# Altium schematic symbol library Capacitor.SchLib: 735 symbols (part 14 of 20)
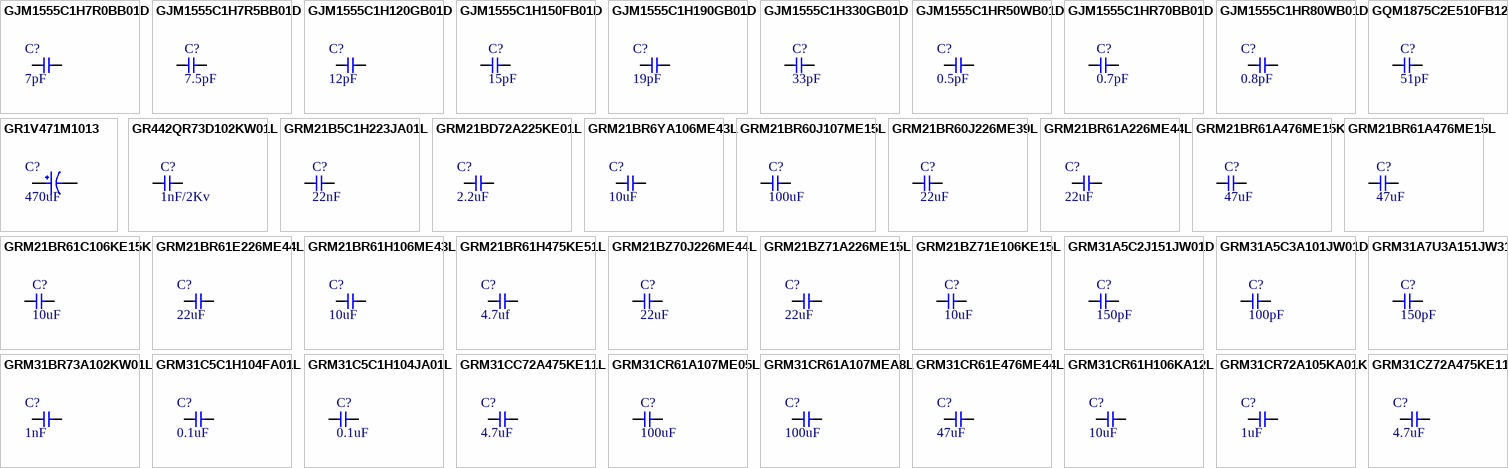
[diagram p31: symbols GJM1555C1H7R0BB01D to GRM31CZ72A475KE11L]

## GRM21BR6YA106ME43L
designator C?, comment 10uF
CAP CER 10UF 35V X5R 0805; Manufacturer: Murata; Manufacturer Part Number: GRM21BR6YA106ME43L; Tolerance: 20%; Supplier 1: Digi-Key; Stock 1: 153536; Pricing 1: 1=0.43, 10=0.302, 50=0.2114, 100=0.1811, 500=0.13584, 1000=0.11471 (USD); Mount: Surface Mount; Case/Package: 0805; Case Code (Metric): 2012; Case Code (Imperial): 0805; Weight: 0.000335oz; Min Operating Temperature: -55°C; Max Operating Temperature: 85°C; Capacitance: 10uF; Packaging: Tape and Reel; Voltage Rating: 35V; Dielectric: X5R; Termination: SMD/SMT; Voltage Rating (DC): 35V; Package Quantity: 3000; Length: 0.079inch; Width: 0.049inch; Height: 1.25mm; Thickness: 0.057inch; RoHS Compliant: Yes; ComponentLink1URL: http://www.mouser.com/ds/2/281/c02e-2905.pdf?src-supplier=Mouser; ComponentLink1Description: http://www.mouser.com/ds/2/281/c02e-2905.pdf?src-supplier=Mouser; ComponentLink2URL: http://search.murata.co.jp/Ceramy/image/img/A01X/G101/ENG/GRM21BR6YA106ME43-01.pdf?src-supplier=Digi-Key; ComponentLink2Description: http://search.murata.co.jp/Ceramy/image/img/A01X/G101/ENG/GRM21BR6YA106ME43-01.pdf?src-supplier=Digi-Key; Supplier Part Number 1: 490-10515-1-ND; LCSC Part Number: C361063
footprint Cap-0805 (SMD 0805)
pins: 1, 2

## GRM21BR60J107ME15L
designator C?, comment 100uF
CAP CER 100UF 6.3V X5R 0805; Manufacturer: Murata; Manufacturer Part Number: GRM21BR60J107ME15L; Item Type: Capacitors; Material: 4241ConductorMaterial; Tolerance: 20%; Supplier: Mouser; LCSC Part Number: C141660; RoHS: Yes; Stock: 94172; Pricing: 1=1.28, 10=0.697, 50=0.697, 100=0.633, 1000=0.485, 10000=0.384 (USD); Mounting Technology: Surface Mount; Case/Package: 0805; Case Code (Metric): 2012; Case Code (Imperial): 0805; Min Operating Temperature: -55°C; Max Operating Temperature: 85°C; Packaging: Cut Tape; Voltage Rating: 6.3V; Dielectric: X5R; Voltage Rating (DC): 6.3V; Value: 100uF; Series: GRM; Length: 0.079inch; Width: 0.049inch; Height: 1.45mm; Thickness: 0.057inch; Reach SVHC Compliant: No; Lead Free: Lead Free; RoHS Compliant: Yes; ComponentLink1URL: http://www.farnell.com/datasheets/1957830.pdf?src-supplier=Farnell; ComponentLink1Description: http://www.farnell.com/datasheets/1957830.pdf?src-supplier=Farnell; ComponentLink2URL: https://datasheet.octopart.com/GRM21BR60J107ME15L-Murata-datasheet-48012791.pdf?src-supplier=Element14; ComponentLink2Description: https://datasheet.octopart.com/GRM21BR60J107ME15L-Murata-datasheet-48012791.pdf?src-supplier=Element14; ComponentLink3URL: http://www.farnell.com/datasheets/1957830.pdf?src-supplier=Element14; ComponentLink3Description: http://www.farnell.com/datasheets/1957830.pdf?src-supplier=Element14; ComponentLink4URL: https://search.murata.co.jp/Ceramy/image/img/A01X/G101/ENG/GRM21BR60J107ME15-01.pdf?src-supplier=Digikey; ComponentLink4Description: https://search.murata.co.jp/Ceramy/image/img/A01X/G101/ENG/GRM21BR60J107ME15-01.pdf?src-supplier=Digikey; ComponentLink5URL: https://datasheet.octopart.com/GRM21BR60J107ME15L-Murata-datasheet-62287462.pdf?src-supplier=Future+Electronics; ComponentLink5Description: https://datasheet.octopart.com/GRM21BR60J107ME15L-Murata-datasheet-62287462.pdf?src-supplier=Future+Electronics; ComponentLink6URL: http://www.farnell.com/datasheets/1957830.pdf?src-supplier=Newark; ComponentLink6Description: http://www.farnell.com/datasheets/1957830.pdf?src-supplier=Newark; ComponentLink7URL: https://datasheet.octopart.com/GRM21BR60J107ME15L-Murata-datasheet-165579666.pdf?src-supplier=TME; ComponentLink7Description: https://datasheet.octopart.com/GRM21BR60J107ME15L-Murata-datasheet-165579666.pdf?src-supplier=TME
footprint Cap-0805 (SMD 0805)
pins: 1, 2

## GRM21BR60J226ME39L
designator C?, comment 22uF
CAP CER 22UF 6.3V X5R 0805; Manufacturer: Murata; Manufacturer Part Number: GRM21BR60J226ME39L; Item Type: Capacitors; Material: Ceramic; Tolerance: 20%; Supplier: Mouser; LCSC Part Number: C77071; RoHS: Yes; Stock: 255937; Pricing: 1=0.29, 10=0.139, 50=0.139, 100=0.09, 1000=0.057, 10000=0.046 (USD); Mounting Technology: Surface Mount; Case/Package: 0805; Case Code (Metric): 2012; Case Code (Imperial): 0805; Min Operating Temperature: -55°C; Max Operating Temperature: 85°C; Value: 22uF; Dielectric: X5R; Packaging: Tape and Reel; Voltage Rating: 6.3V; Package Quantity: 1; Voltage Rating (DC): 6.3V; Termination: SMD/SMT; Voltage: 6.3V; Series: GRM; Construction: Flat; Length: 2mm; Width: 0.049inch; Height: 1.25mm; Thickness: 0.053inch; Depth: 1.25mm; Radiation Hardening: No; Reach SVHC Compliant: No; Lead Free: Lead Free; RoHS Compliant: Yes; ComponentLink1URL: https://datasheet.ciiva.com/34302/1858877-34302872.pdf?src-supplier=Jameco; ComponentLink1Description: https://datasheet.ciiva.com/34302/1858877-34302872.pdf?src-supplier=Jameco; ComponentLink2URL: https://datasheet.ciiva.com/28685/415298-28685393.pdf?src-supplier=Element14; ComponentLink2Description: https://datasheet.ciiva.com/28685/415298-28685393.pdf?src-supplier=Element14; ComponentLink3URL: https://datasheet.ciiva.com/3777/162grm21br60j226me3923-3777075.pdf?src-supplier=Arrow+Electronics; ComponentLink3Description: https://datasheet.ciiva.com/3777/162grm21br60j226me3923-3777075.pdf?src-supplier=Arrow+Electronics; ComponentLink4URL: https://datasheet.ciiva.com/29202/450907-da-01-de-vs-chip-kond-0805-22-0-uf-20pr-6-3v-x5r-29202711.pdf?src-supplier=Conrad; ComponentLink4Description: https://datasheet.ciiva.com/29202/450907-da-01-de-vs-chip-kond-0805-22-0-uf-20pr-6-3v-x5r-29202711.pdf?src-supplier=Conrad; ComponentLink5URL: https://datasheet.ciiva.com/29199/454561-da-01-en-vs-kondensator-0805-29199600.pdf?src-supplier=Conrad; ComponentLink5Description: https://datasheet.ciiva.com/29199/454561-da-01-en-vs-kondensator-0805-29199600.pdf?src-supplier=Conrad; ComponentLink6URL: https://datasheet.ciiva.com/14116/grmseries-highdielectrictype-eng-14116430.pdf?src-supplier=Distrelec; ComponentLink6Description: https://datasheet.ciiva.com/14116/grmseries-highdielectrictype-eng-14116430.pdf?src-supplier=Distrelec; ComponentLink7URL: https://datasheet.ciiva.com/7719/1747467-7719085.pdf?src-supplier=Element14; ComponentLink7Description: https://datasheet.ciiva.com/7719/1747467-7719085.pdf?src-supplier=Element14; ComponentLink8URL: https://datasheet.ciiva.com/7719/1747467-7719086.pdf?src-supplier=Element14; ComponentLink8Description: https://datasheet.ciiva.com/7719/1747467-7719086.pdf?src-supplier=Element14; ComponentLink9URL: https://datasheet.ciiva.com/137/partnumbering-e-01-137972.pdf?src-supplier=Digikey; ComponentLink9Description: https://datasheet.ciiva.com/137/partnumbering-e-01-137972.pdf?src-supplier=Digikey; ComponentLink10URL: https://datasheet.ciiva.com/137/partnumbering-e-01-137971.pdf?src-supplier=Digikey; ComponentLink10Description: https://datasheet.ciiva.com/137/partnumbering-e-01-137971.pdf?src-supplier=Digikey; ComponentLink11URL: https://datasheet.ciiva.com/137/partnumbering-e-01-137973.pdf?src-supplier=Digikey; ComponentLink11Description: https://datasheet.ciiva.com/137/partnumbering-e-01-137973.pdf?src-supplier=Digikey; ComponentLink12URL: https://datasheet.ciiva.com/2989/product-2989692.pdf?src-supplier=Avnet; ComponentLink12Description: https://datasheet.ciiva.com/2989/product-2989692.pdf?src-supplier=Avnet
footprint Cap-0805 (SMD 0805)
pins: 1, 2

## GRM21BR61A226ME44L
designator C?, comment 22uF
CAP CER 22UF 10V X5R 0805; Manufacturer: Murata; Manufacturer Part Number: GRM21BR61A226ME44L; Dielectric Material: Ceramic; Tolerance: 20%; Dissipation Factor: 0.035%; Item Type: Capacitor; Supplier 1: Arrow Electronics; RoHS: Yes; Category: Ceramic Capacitors; Stock 1: 3000; Pricing 1: 3000=0.08250, 6000=0.06070, 9000=0.06010, 15000=0.05960 (USD); Mounting Technology: Surface Mount; Case/Package: 0805; Case Code (Metric): 2012; Case Code (Imperial): 0805; Weight: 0.000335oz; Min Operating Temperature: -55°C; Max Operating Temperature: 85°C; Value: 22uF; Dielectric: X5R; Voltage Rating (DC): 10V; Packaging: Tape and Reel; Voltage Rating: 10V; Voltage: 10V; Termination: SMD/SMT; Package Quantity: 3000; Series: GRM; Length: 2mm; Width: 0.049inch; Height: 1.25mm; Thickness: 0.057inch; Depth: 1.25mm; Lead Free: Lead Free; RoHS Compliant: Yes; ComponentLink1URL: http://www.mouser.com/ds/2/281/c02e-2905.pdf?src-supplier=Mouser; ComponentLink1Description: http://www.mouser.com/ds/2/281/c02e-2905.pdf?src-supplier=Mouser; ComponentLink2URL: http://search.murata.co.jp/Ceramy/image/img/A01X/G101/ENG/GRM21BR61A226ME44-01.pdf?src-supplier=Digi-Key; ComponentLink2Description: http://search.murata.co.jp/Ceramy/image/img/A01X/G101/ENG/GRM21BR61A226ME44-01.pdf?src-supplier=Digi-Key; ComponentLink3URL: http://search.murata.co.jp/Ceramy/image/img/A01X/partnumbering_e_01.pdf?src-supplier=Digi-Key; ComponentLink3Description: http://search.murata.co.jp/Ceramy/image/img/A01X/partnumbering_e_01.pdf?src-supplier=Digi-Key; Supplier Part Number 1: GRM21BR61A226ME44L; LCSC Part Number: C441864
footprint Cap-0805 (SMD 0805)
pins: 1, 2

## GRM21BR61A476ME15K
designator C?, comment 47uF
CAP CER 47UF 10V X5R 0805; Manufacturer: Murata; Manufacturer Part Number: GRM21BR61A476ME15K; Item Type: Capacitors; Material: 4241ConductorMaterial; Tolerance: 20%; Supplier: Future Electronics; LCSC Part Number: C2292827; RoHS: Yes; Stock: 80000; Pricing: 10000=0.15 (USD); Mounting Technology: Surface Mount; Case/Package: 0805; Case Code (Imperial): 0805; Case Code (Metric): 2012; Weight: 0.000335oz; Min Operating Temperature: -55°C; Max Operating Temperature: 85°C; Packaging: Tape and Reel; Value: 47uF; Voltage Rating: 10V; Dielectric: X5R; Termination: SMD/SMT; Voltage Rating (DC): 10V; Package Quantity: 10000; Series: GRM; Height: 1.45mm; RoHS Compliant: Yes; ComponentLink1URL: http://www.mouser.com/ds/2/281/c02e-2905.pdf?src-supplier=Mouser; ComponentLink1Description: http://www.mouser.com/ds/2/281/c02e-2905.pdf?src-supplier=Mouser; ComponentLink2URL: http://psearch.en.murata.com/capacitor/product/GRM21BR61A476ME15%23.pdf?src-supplier=Avnet; ComponentLink2Description: http://psearch.en.murata.com/capacitor/product/GRM21BR61A476ME15%23.pdf?src-supplier=Avnet; ComponentLink3URL: https://www.murata.com/~/media/webrenewal/support/library/catalog/products/capacitor/mlcc/c02e.ashx?la=en-us&src-supplier=Digikey; ComponentLink3Description: https://www.murata.com/~/media/webrenewal/support/library/catalog/products/capacitor/mlcc/c02e.ashx?la=en-us&src-supplier=Digikey
footprint Cap-0805 (SMD 0805)
pins: 1, 2

## GRM21BR61A476ME15L
designator C?, comment 47uF
CAP CER 47UF 10V X5R 0805; Manufacturer: Murata; Manufacturer Part Number: GRM21BR61A476ME15L; Item Type: Capacitors; Dielectric Material: Ceramic; Material: 4241ConductorMaterial; Tolerance: 20%; Dissipation Factor: 0.035%; Supplier: Future Electronics; LCSC Part Number: C124129; RoHS: Yes; Stock: 315000; Pricing: 3000=0.161, 6000=0.157, 9000=0.156, 12000=0.154, 15000=0.15 (USD); Mounting Technology: Surface Mount; Case/Package: 0805; Case Code (Metric): 2012; Case Code (Imperial): 0805; Min Operating Temperature: -55°C; Max Operating Temperature: 85°C; Value: 47uF; Packaging: Cut Tape; Dielectric: X5R; Voltage Rating: 10V; Voltage: 10V; Termination: SMD/SMT; Voltage Rating (DC): 10V; Series: GRM; Length: 0.079inch; Width: 0.049inch; Height: 1.25mm; Thickness: 0.057inch; Depth: 1.25mm; Reach SVHC Compliant: No; Lead Free: Lead Free; RoHS Compliant: Yes; ComponentLink1URL: http://www.farnell.com/datasheets/2079183.pdf?src-supplier=Farnell; ComponentLink1Description: http://www.farnell.com/datasheets/2079183.pdf?src-supplier=Farnell; ComponentLink2URL: http://www.farnell.com/datasheets/2079183.pdf?src-supplier=Newark; ComponentLink2Description: http://www.farnell.com/datasheets/2079183.pdf?src-supplier=Newark; ComponentLink3URL: http://www.farnell.com/datasheets/2079183.pdf?src-supplier=Element14; ComponentLink3Description: http://www.farnell.com/datasheets/2079183.pdf?src-supplier=Element14; ComponentLink4URL: https://datasheet.octopart.com/GRM21BR61A476ME15L-Murata-datasheet-66077109.pdf?src-supplier=Element14; ComponentLink4Description: https://datasheet.octopart.com/GRM21BR61A476ME15L-Murata-datasheet-66077109.pdf?src-supplier=Element14; ComponentLink5URL: http://search.murata.co.jp/Ceramy/image/img/A01X/G101/ENG/GRM21BR61A476ME15-01.pdf?src-supplier=Digikey; ComponentLink5Description: http://search.murata.co.jp/Ceramy/image/img/A01X/G101/ENG/GRM21BR61A476ME15-01.pdf?src-supplier=Digikey; ComponentLink6URL: https://search.murata.co.jp/Ceramy/image/img/A01X/G101/ENG/GRM21BR61A476ME15-01.pdf?src-supplier=Digikey; ComponentLink6Description: https://search.murata.co.jp/Ceramy/image/img/A01X/G101/ENG/GRM21BR61A476ME15-01.pdf?src-supplier=Digikey; ComponentLink7URL: http://psearch.en.murata.com/capacitor/product/GRM21BR61A476ME15%23.pdf?src-supplier=Avnet; ComponentLink7Description: http://psearch.en.murata.com/capacitor/product/GRM21BR61A476ME15%23.pdf?src-supplier=Avnet
footprint Cap-0805 (SMD 0805)
pins: 1, 2

## GRM21BR61C106KE15K
designator C?, comment 10uF
CAP CER 10UF 16V X5R 0805; Manufacturer: Murata; Manufacturer Part Number: GRM21BR61C106KE15K; Item Type: Capacitors; Material: 4241ConductorMaterial; Supplier: Mouser; LCSC Part Number: C408141; RoHS: Yes; Stock: 280249; Pricing: 1=0.11, 10=0.042, 50=0.042, 100=0.027, 1000=0.024, 10000=0.019 (USD); Voltage Rating (DC): 16V; ComponentLink1URL: https://datasheet.ciiva.com/26822/getdatasheetpartid-31687-26822939.pdf?src-supplier=Verical; ComponentLink1Description: https://datasheet.ciiva.com/26822/getdatasheetpartid-31687-26822939.pdf?src-supplier=Verical; ComponentLink2URL: https://datasheet.ciiva.com/6270/partnumbering-e-01-6270407.pdf?src-supplier=Digikey; ComponentLink2Description: https://datasheet.ciiva.com/6270/partnumbering-e-01-6270407.pdf?src-supplier=Digikey; ComponentLink3URL: https://datasheet.ciiva.com/6270/partnumbering-e-01-6270410.pdf?src-supplier=Digikey; ComponentLink3Description: https://datasheet.ciiva.com/6270/partnumbering-e-01-6270410.pdf?src-supplier=Digikey; ComponentLink4URL: https://datasheet.ciiva.com/6270/partnumbering-e-01-6270412.pdf?src-supplier=Digikey; ComponentLink4Description: https://datasheet.ciiva.com/6270/partnumbering-e-01-6270412.pdf?src-supplier=Digikey; ComponentLink5URL: https://datasheet.ciiva.com/5414/product-5414934.pdf?src-supplier=Mouser; ComponentLink5Description: https://datasheet.ciiva.com/5414/product-5414934.pdf?src-supplier=Mouser
footprint Cap-0805 (SMD 0805)
pins: 1, 2

## GRM21BR61E226ME44L
designator C?, comment 22uF
CAP CER 22UF 25V X5R 0805; Manufacturer: Murata; Manufacturer Part Number: GRM21BR61E226ME44L; Material: Ceramic; Tolerance: 20%; Item Type: Capacitor; Supplier 1: Arrow Electronics; RoHS: Yes; Category: Ceramic Capacitors; Stock 1: 21193; Pricing 1: 1=0.45930, 10=0.35000, 25=0.33950, 50=0.26910, 100=0.22090, 250=0.21320, 500=0.16760, 1000=0.14640, 3000=0.11710, 6000=0.10550, 15000=0.10450 (USD); Mount: Surface Mount; Case/Package: 0805; Case Code (Metric): 2012; Case Code (Imperial): 0805; Weight: 0.000335oz; Min Operating Temperature: -55°C; Max Operating Temperature: 85°C; Capacitance: 22uF; Voltage Rating: 25V; Packaging: Tape and Reel; Dielectric: X5R; Voltage: 25V; Termination: SMD/SMT; Resistor Type: Ceramic; Voltage Rating (DC): 25V; Package Quantity: 3000; Series: GRM; Construction: Flat; Length: 2mm; Width: 1.25mm; Height: 1.25mm; Thickness: 0.057inch; Depth: 1.25mm; REACH SVHC: No SVHC; Lead Free: Lead Free; RoHS Compliant: Yes; ComponentLink1URL: https://datasheet.ciiva.com/22787/1747471-22787265.pdf?src-supplier=Farnell; ComponentLink1Description: https://datasheet.ciiva.com/22787/1747471-22787265.pdf?src-supplier=Farnell; ComponentLink2URL: https://datasheet.ciiva.com/7719/1747471-7719095.pdf?src-supplier=Element14; ComponentLink2Description: https://datasheet.ciiva.com/7719/1747471-7719095.pdf?src-supplier=Element14; ComponentLink3URL: https://datasheet.ciiva.com/28584/1747471-28584199.pdf?src-supplier=Element14; ComponentLink3Description: https://datasheet.ciiva.com/28584/1747471-28584199.pdf?src-supplier=Element14; Supplier Part Number 1: GRM21BR61E226ME44L; LCSC Part Number: C86816
footprint Cap-0805 (SMD 0805)
pins: 1, 2

## GRM21BR61H106ME43L
designator C?, comment 10uF
CAP CER 10UF 50V X5R 0805; Manufacturer: Murata; Manufacturer Part Number: GRM21BR61H106ME43L; Supplier 1: Digi-Key; RoHS: Yes; Category: Ceramic Capacitors; Stock 1: 26; Pricing 1: 1=0.44000, 10=0.30700, 50=0.21500, 100=0.18420, 500=0.13818, 1000=0.11668 (USD); Supplier Part Number 1: 490-18664-1-ND; LCSC Part Number: C2190942
footprint Cap-0805 (SMD 0805)
pins: 1, 2

## GRM21BR61H475KE51L
designator C?, comment 4.7uf
CAP CER 4.7UF 50V X5R 0805; Manufacturer: Murata; Manufacturer Part Number: GRM21BR61H475KE51L; Material: Ceramic; Tolerance: 10%; Item Type: Capacitor; Supplier 1: Rs; RoHS: Yes; Category: Ceramic Capacitors; Stock 1: 37300; Pricing 1: 500=0.09400, 1000=0.08800, 2000=0.08300, 5000=0.07500 (GBP); Mount: Surface Mount; Case/Package: 0805; Case Code (Metric): 2012; Case Code (Imperial): 0805; Min Operating Temperature: -55°C; Max Operating Temperature: 85°C; Capacitance: 4.7uF; Packaging: Tape and Reel; Dielectric: X5R; Voltage Rating: 50V; Voltage Rating (DC): 50V; Series: GRM; Length: 2mm; Width: 0.049inch; Height: 1.25mm; Thickness: 0.055inch; Depth: 1.25mm; Reach SVHC Compliant: Yes; Lead Free: Lead Free; RoHS Compliant: Yes; ComponentLink1URL: http://www.farnell.com/datasheets/2079186.pdf?src-supplier=Farnell; ComponentLink1Description: http://www.farnell.com/datasheets/2079186.pdf?src-supplier=Farnell; ComponentLink2URL: http://components.arrow.com/part/dataview/61084395S454511N2606?src-supplier=Arrow+Electronics; ComponentLink2Description: http://components.arrow.com/part/dataview/61084395S454511N2606?src-supplier=Arrow+Electronics; ComponentLink3URL: http://www.farnell.com/datasheets/2079186.pdf?src-supplier=Element14; ComponentLink3Description: http://www.farnell.com/datasheets/2079186.pdf?src-supplier=Element14; ComponentLink4URL: http://search.murata.co.jp/Ceramy/image/img/A01X/G101/ENG/GRM21BR61H475KE51-01.pdf?src-supplier=Digi-Key; ComponentLink4Description: http://search.murata.co.jp/Ceramy/image/img/A01X/G101/ENG/GRM21BR61H475KE51-01.pdf?src-supplier=Digi-Key; ComponentLink5URL: https://search.murata.co.jp/Ceramy/image/img/A01X/G101/ENG/GRM21BR61H475KE51-01.pdf?src-supplier=Digi-Key; ComponentLink5Description: https://search.murata.co.jp/Ceramy/image/img/A01X/G101/ENG/GRM21BR61H475KE51-01.pdf?src-supplier=Digi-Key; ComponentLink6URL: http://www.farnell.com/datasheets/2079186.pdf?src-supplier=Newark; ComponentLink6Description: http://www.farnell.com/datasheets/2079186.pdf?src-supplier=Newark; Supplier Part Number 1: 1138707P; LCSC Part Number: C162420
footprint Cap-0805
pins: 1, 2

## GRM21BZ70J226ME44L
designator C?, comment 22uF
CAP CER 22UF 6.3V X7R 0805; Manufacturer: Murata; Manufacturer Part Number: GRM21BZ70J226ME44L; Item Type: Capacitors; Material: 4241ConductorMaterial; Tolerance: 20%; Supplier: Mouser; LCSC Part Number: C1517827; RoHS: Yes; Stock: 88243; Pricing: 1=0.41, 10=0.243, 50=0.243, 100=0.154, 1000=0.108, 10000=0.082 (USD); Case/Package: 339Case; Min Operating Temperature: -55°C; Max Operating Temperature: 125°C; Value: 22uF; Voltage Rating: 6.3V; Length: 2mm; Width: 1.25mm; Height: 1.45mm; Thickness: 1.25mm; RoHS Compliant: Yes
footprint Cap-0805 (SMD 0805)
pins: 1, 2

## GRM21BZ71A226ME15L
designator C?, comment 22uF
CAP CER 22UF 10V X7R 0805; Manufacturer: Murata; Manufacturer Part Number: GRM21BZ71A226ME15L; Material: 4241ConductorMaterial; Tolerance: 20%; Item Type: Capacitor; Supplier: Digi-Key; Supplier Part Number: 490-GRM21BZ71A226ME15LCT-ND; RoHS: Yes; Category: Ceramic Capacitors; Stock: 49126; Pricing: 1=0.39, 10=0.259, 50=0.191, 100=0.1556, 500=0.12282, 1000=0.10372 (USD); Package: 0805; Min Operating Temperature: -55°C; Max Operating Temperature: 125°C; Value: 22uF; Voltage Rating: 10V; Length: 2mm; Width: 1.25mm; Height: 1.45mm; Thickness: 1.25mm; ComponentLink1URL: https://datasheet.octopart.com/GRM21BZ71A226ME15L-Murata-datasheet-165579666.pdf?src-supplier=TME; ComponentLink1Description: https://datasheet.octopart.com/GRM21BZ71A226ME15L-Murata-datasheet-165579666.pdf?src-supplier=TME; LCSC Part Number: C907991; ComponentLink2Description: LCSC; ComponentLink2URL: https://www.lcsc.com/product-detail/Multilayer-Ceramic-Capacitors-MLCC-SMD-SMT_Murata-Electronics-GRM21BZ71A226ME15L_C907991.html
footprint Cap-0805 (SMD 0805)
pins: 1, 2

## GRM21BZ71E106KE15L
designator C?, comment 10uF
CAP CER 10UF 25V X7R 0805; Manufacturer: Murata; Manufacturer Part Number: GRM21BZ71E106KE15L; Item Type: Capacitors; Material: 4241ConductorMaterial; Tolerance: 10%; Supplier: Mouser; LCSC Part Number: C237493; RoHS: Yes; Stock: 43117; Pricing: 1=0.34, 10=0.142, 50=0.142, 100=0.096, 1000=0.086, 10000=0.058 (USD); Case/Package: 339Case; Min Operating Temperature: -55°C; Max Operating Temperature: 125°C; Value: 10uF; Voltage Rating: 25V; Length: 2mm; Width: 1.25mm; Height: 1.45mm; Thickness: 1.25mm; RoHS Compliant: Yes
footprint Cap-0805 (SMD 0805)
pins: 1, 2

## GRM31A5C2J151JW01D
designator C?, comment 150pF
CAP CER 150PF 630V C0G/NP0 1206; Manufacturer: Murata; Manufacturer Part Number: GRM31A5C2J151JW01D; Item Type: Capacitor; Supplier: Mouser; LCSC Part Number: C162445; RoHS: Yes; Stock: 4361; Pricing: 1=0.35, 10=0.194, 50=0.194, 100=0.12, 1000=0.1, 10000=0.08 (USD); ComponentLink1URL: https://datasheet.ciiva.com/138/partnumbering-e-01-138796.pdf?src-supplier=Digikey; ComponentLink1Description: https://datasheet.ciiva.com/138/partnumbering-e-01-138796.pdf?src-supplier=Digikey; ComponentLink2URL: https://datasheet.ciiva.com/138/partnumbering-e-01-138797.pdf?src-supplier=Digikey; ComponentLink2Description: https://datasheet.ciiva.com/138/partnumbering-e-01-138797.pdf?src-supplier=Digikey; ComponentLink3URL: https://datasheet.ciiva.com/138/partnumbering-e-01-138798.pdf?src-supplier=Digikey; ComponentLink3Description: https://datasheet.ciiva.com/138/partnumbering-e-01-138798.pdf?src-supplier=Digikey; ComponentLink4URL: https://datasheet.ciiva.com/13240/c02e-2905-13240518.pdf?src-supplier=Mouser; ComponentLink4Description: https://datasheet.ciiva.com/13240/c02e-2905-13240518.pdf?src-supplier=Mouser
footprint Cap-1206 (SMD 1206)
pins: 1, 2

## GRM31A5C3A101JW01D
designator C?, comment 100pF
CAP CER 100PF 1KV 5% NP0 1206; Manufacturer: Murata; Manufacturer Part Number: GRM31A5C3A101JW01D; Item Type: Capacitor; Supplier: Future Electronics; LCSC Part Number: C162451; RoHS: Yes; Stock: 4000; Pricing: 4000=0.0742, 8000=0.0723, 12000=0.0712, 16000=0.0704, 20000=0.068 (USD); ComponentLink1URL: https://datasheet.ciiva.com/29535/partnumbering-e-01-29535608.pdf?src-supplier=Digikey; ComponentLink1Description: https://datasheet.ciiva.com/29535/partnumbering-e-01-29535608.pdf?src-supplier=Digikey; ComponentLink2URL: https://datasheet.ciiva.com/7829/1666664-7829029.pdf?src-supplier=Element14; ComponentLink2Description: https://datasheet.ciiva.com/7829/1666664-7829029.pdf?src-supplier=Element14
footprint Cap-1206 (SMD 1206)
pins: 1, 2

## GRM31A7U3A151JW31D
designator C?, comment 150pF
CAP CER 150PF 1KV U2J 1206; Manufacturer: Murata; Manufacturer Part Number: GRM31A7U3A151JW31D; Item Type: Capacitors; Temperature Coefficient: -750ppm/°C; Supplier: Mouser; LCSC Part Number: C162467; RoHS: Yes; Stock: 15950; Pricing: 1=0.39, 10=0.191, 50=0.191, 100=0.123, 1000=0.098, 10000=0.085 (USD); ComponentLink1URL: https://datasheet.ciiva.com/16214/product-16214766.pdf?src-supplier=Future+Electronics; ComponentLink1Description: https://datasheet.ciiva.com/16214/product-16214766.pdf?src-supplier=Future+Electronics; ComponentLink2URL: https://datasheet.ciiva.com/139/partnumbering-e-01-139260.pdf?src-supplier=Digikey; ComponentLink2Description: https://datasheet.ciiva.com/139/partnumbering-e-01-139260.pdf?src-supplier=Digikey; ComponentLink3URL: https://datasheet.ciiva.com/139/partnumbering-e-01-139261.pdf?src-supplier=Digikey; ComponentLink3Description: https://datasheet.ciiva.com/139/partnumbering-e-01-139261.pdf?src-supplier=Digikey; ComponentLink4URL: https://datasheet.ciiva.com/139/partnumbering-e-01-139262.pdf?src-supplier=Digikey; ComponentLink4Description: https://datasheet.ciiva.com/139/partnumbering-e-01-139262.pdf?src-supplier=Digikey
footprint Cap-1206 (SMD 1206)
pins: 1, 2

## GRM31BR73A102KW01L
designator C?, comment 1nF
CAP CER 1000PF 1KV X7R 1206; Manufacturer: Murata; Manufacturer Part Number: GRM31BR73A102KW01L; Item Type: Capacitors; Supplier: Mouser; LCSC Part Number: C97941; RoHS: Yes; Stock: 17487; Pricing: 1=0.74, 10=0.361, 50=0.361, 100=0.309, 1000=0.219, 10000=0.169 (USD); Lead Free: 5697LeadFree; ComponentLink1URL: https://datasheet.ciiva.com/138/partnumbering-e-01-138541.pdf?src-supplier=Digikey; ComponentLink1Description: https://datasheet.ciiva.com/138/partnumbering-e-01-138541.pdf?src-supplier=Digikey; ComponentLink2URL: https://datasheet.ciiva.com/138/partnumbering-e-01-138542.pdf?src-supplier=Digikey; ComponentLink2Description: https://datasheet.ciiva.com/138/partnumbering-e-01-138542.pdf?src-supplier=Digikey; ComponentLink3URL: https://datasheet.ciiva.com/138/partnumbering-e-01-138543.pdf?src-supplier=Digikey; ComponentLink3Description: https://datasheet.ciiva.com/138/partnumbering-e-01-138543.pdf?src-supplier=Digikey; ComponentLink4URL: https://datasheet.ciiva.com/5421/c02e-5421641.pdf?src-supplier=Mouser; ComponentLink4Description: https://datasheet.ciiva.com/5421/c02e-5421641.pdf?src-supplier=Mouser; ComponentLink5URL: https://datasheet.ciiva.com/48512/grm31br73a102kw01l-eng-tds-48512268.pdf?src-supplier=Distrelec; ComponentLink5Description: https://datasheet.ciiva.com/48512/grm31br73a102kw01l-eng-tds-48512268.pdf?src-supplier=Distrelec
footprint Cap-1206 (SMD 1206)
pins: 1, 2

## GRM31C5C1H104FA01L
designator C?, comment 0.1uF
50V 100nF C0G ±1% 1206 Multilayer Ceramic Capacitors MLCC - SMD/SMT ROHS; Manufacturer: Murata Electronics; Manufacturer Part Number: GRM31C5C1H104FA01L; LCSC Part Number: C2981728; Item Type: Capacitor; ComponentLink1Description: LCSC; ComponentLink1URL: https://www.lcsc.com/product-detail/Multilayer-Ceramic-Capacitors-MLCC-SMD-SMT_Murata-Electronics-GRM31C5C1H104FA01L_C2981728.html
footprint Cap-1206 (SMD 1206)
pins: 1, 2

## GRM31C5C1H104JA01L
designator C?, comment 0.1uF
CAP CER 0.1UF 50V C0G/NP0 1206; Manufacturer: Murata; Manufacturer Part Number: GRM31C5C1H104JA01L; Item Type: Capacitors; Material: Ceramic; Value: 100nF; Tolerance: 5%; Dielectric: C0G; Temperature Coefficient: 30ppm/°C; Supplier: Mouser; LCSC Part Number: C97946; RoHS: Yes; Stock: 12942; Pricing: 1=0.5, 10=0.247, 50=0.247, 100=0.184, 1000=0.158, 10000=0.119 (USD); Mounting Technology: Surface Mount; Case/Package: 1206; Case Code (Metric): 3216; Case Code (Imperial): 1206; Weight: 0.000571oz; Min Operating Temperature: -55°C; Max Operating Temperature: 125°C; Packaging: Tape and Reel; Package Quantity: 1; Voltage Rating: 50V; Voltage Rating (DC): 50V; Termination: SMD/SMT; Voltage: 50V; Series: GRM; Construction: Flat; Length: 3.2mm; Width: 0.063inch; Height: 1.6mm; Thickness: 0.071inch; Depth: 1.6mm; Radiation Hardening: No; Reach SVHC Compliant: No; RoHS Compliant: Yes; Lead Free: 5697LeadFree; ComponentLink1URL: https://datasheet.ciiva.com/11618/product-11618880.pdf?src-supplier=Avnet; ComponentLink1Description: https://datasheet.ciiva.com/11618/product-11618880.pdf?src-supplier=Avnet; ComponentLink2URL: https://datasheet.ciiva.com/29200/453430-da-01-en-vs-kondensator-1206-29200201.pdf?src-supplier=Conrad; ComponentLink2Description: https://datasheet.ciiva.com/29200/453430-da-01-en-vs-kondensator-1206-29200201.pdf?src-supplier=Conrad; ComponentLink3URL: https://datasheet.ciiva.com/6270/partnumbering-e-01-6270255.pdf?src-supplier=Digikey; ComponentLink3Description: https://datasheet.ciiva.com/6270/partnumbering-e-01-6270255.pdf?src-supplier=Digikey; ComponentLink4URL: https://datasheet.ciiva.com/5420/product-5420070.pdf?src-supplier=Mouser; ComponentLink4Description: https://datasheet.ciiva.com/5420/product-5420070.pdf?src-supplier=Mouser; ComponentLink5URL: https://datasheet.ciiva.com/16461/product-16461275.pdf?src-supplier=Future+Electronics; ComponentLink5Description: https://datasheet.ciiva.com/16461/product-16461275.pdf?src-supplier=Future+Electronics
footprint Cap-1206 (SMD 1206)
pins: 1, 2

## GRM31CC72A475KE11L
designator C?, comment 4.7uF
CAP CER 4.7UF 100V X7S 1206; Manufacturer: Murata; Manufacturer Part Number: GRM31CC72A475KE11L; Item Type: Capacitor; Supplier 1: Arrow Electronics; RoHS: Yes; Category: Ceramic Capacitors; Stock 1: 120000; Pricing 1: 2000=0.23470, 4000=0.21710, 10000=0.21040, 14000=0.20560 (USD); RoHS Compliant: Yes; ComponentLink1URL: https://search.murata.co.jp/Ceramy/image/img/A01X/G101/ENG/GRM31CC72A475KE11-01A.pdf?src-supplier=Digi-Key; ComponentLink1Description: https://search.murata.co.jp/Ceramy/image/img/A01X/G101/ENG/GRM31CC72A475KE11-01A.pdf?src-supplier=Digi-Key; Supplier Part Number 1: GRM31CC72A475KE11L; LCSC Part Number: C237304
footprint Cap-1206 (SMD 1206)
pins: 1, 2

## GRM31CR61A107ME05L
designator C?, comment 100uF
10V 100uF X5R ±20% 1206 Multilayer Ceramic Capacitors MLCC - SMD/SMT ROHS; Manufacturer: Murata; Manufacturer Part Number: GRM31CR61A107ME05L; Supplier: Digikey; Supplier Part Number: 490-GRM31CR61A107ME05LTR-ND; RoHS: Yes; Item Type: Capacitors; ComponentLink1URL: https://datasheet.octopart.com/GRM31CR61A107ME05L-Murata-datasheet-138746337.pdf?src-supplier=Future+Electronics; ComponentLink1Description: https://datasheet.octopart.com/GRM31CR61A107ME05L-Murata-datasheet-138746337.pdf?src-supplier=Future+Electronics; LCSC Part Number: C312983
footprint Cap-1206 (SMD 1206)
pins: 1, 2

## GRM31CR61A107MEA8L
designator C?, comment 100uF
CAP CER 100UF 10V X5R ±20% 1206 Multilayer Ceramic Capacitors MLCC - SMD/SMT ROHS; Manufacturer: Murata Electronics; Manufacturer Part Number: GRM31CR61A107MEA8L; Package: 1206; LCSC Part Number: C883598; Item Type: Capacitor; ComponentLink1Description: LCSC; ComponentLink1URL: https://www.lcsc.com/product-detail/Multilayer-Ceramic-Capacitors-MLCC-SMD-SMT_Murata-Electronics-GRM31CR61A107MEA8L_C883598.html
footprint Cap-1206 (SMD 1206)
pins: 1, 2

## GRM31CR61E476ME44L
designator C?, comment 47uF
CAP CER 47UF 25V X5R 1206; Manufacturer: Murata; Manufacturer Part Number: GRM31CR61E476ME44L; Tolerance: 20%; Item Type: Capacitor; Supplier 1: Digi-Key; RoHS: Yes; Category: Ceramic Capacitors; Capacitance: 47uF; Voltage Rating (DC): 25V; Dielectric: X5R; Length: 3.2mm; Width: 1.6mm; Thickness: 1.6mm; ComponentLink1URL: https://search.murata.co.jp/Ceramy/image/img/A01X/partnumbering_e_01.pdf?src-supplier=Digi-Key; ComponentLink1Description: https://search.murata.co.jp/Ceramy/image/img/A01X/partnumbering_e_01.pdf?src-supplier=Digi-Key; Supplier Part Number 1: 490-16268-2-ND; LCSC Part Number: C403725
footprint Cap-1206 (SMD 1206)
pins: 1, 2

## GRM31CR61H106KA12L
designator C?, comment 10uF
CAP CER 10UF 50V X5R 1206; Manufacturer: Murata; Manufacturer Part Number: GRM31CR61H106KA12L; Tolerance: 10%; Item Type: Capacitor; Supplier 1: Future Electronics; RoHS: Yes; Category: Ceramic Capacitors; Pricing 1: 2000=0.13900, 4000=0.13700, 6000=0.13500, 8000=0.13400, 10000=0.13000 (USD); Mount: Surface Mount; Case/Package: 1206; Case Code (Metric): 3216; Case Code (Imperial): 1206; Weight: 0.001411oz; Min Operating Temperature: -55°C; Max Operating Temperature: 85°C; Capacitance: 10uF; Package Quantity: 2000; Voltage Rating: 50V; Packaging: Cut Tape; Voltage Rating (DC): 50V; Dielectric: X5R; Termination: Standard; Voltage: 50V; Series: GRM; Length: 3.2mm; Width: 1.6mm; Height: 1.6mm; Thickness: 0.071inch; Depth: 1.6mm; Radiation Hardening: No; Reach SVHC Compliant: Yes; Lead Free: Lead Free; RoHS Compliant: Yes; ComponentLink1URL: https://datasheet.ciiva.com/7719/1747481-7719155.pdf?src-supplier=Element14; ComponentLink1Description: https://datasheet.ciiva.com/7719/1747481-7719155.pdf?src-supplier=Element14; ComponentLink2URL: https://datasheet.ciiva.com/5427/product-5427068.pdf?src-supplier=Mouser; ComponentLink2Description: https://datasheet.ciiva.com/5427/product-5427068.pdf?src-supplier=Mouser; ComponentLink3URL: https://datasheet.ciiva.com/6270/partnumbering-e-01-6270263.pdf?src-supplier=Digi-Key; ComponentLink3Description: https://datasheet.ciiva.com/6270/partnumbering-e-01-6270263.pdf?src-supplier=Digi-Key; ComponentLink4URL: https://datasheet.ciiva.com/6270/partnumbering-e-01-6270262.pdf?src-supplier=Digi-Key; ComponentLink4Description: https://datasheet.ciiva.com/6270/partnumbering-e-01-6270262.pdf?src-supplier=Digi-Key; ComponentLink5URL: https://datasheet.ciiva.com/6270/partnumbering-e-01-6270264.pdf?src-supplier=Digi-Key; ComponentLink5Description: https://datasheet.ciiva.com/6270/partnumbering-e-01-6270264.pdf?src-supplier=Digi-Key; ComponentLink6URL: https://datasheet.ciiva.com/16440/c02e-16440669.pdf?src-supplier=Future+Electronics; ComponentLink6Description: https://datasheet.ciiva.com/16440/c02e-16440669.pdf?src-supplier=Future+Electronics; Supplier Part Number 1: 1028474; LCSC Part Number: C77092
footprint Cap-1206 (SMD 1206)
pins: 1, 2

## GRM31CR72A105KA01K
designator C?, comment 1uF
CAP CER 1UF 100V X7R 1206; Manufacturer: Murata; Manufacturer Part Number: GRM31CR72A105KA01K; Tolerance: 10%; Supplier 1: Digi-Key; RoHS: Yes; Category: Ceramic Capacitors; Stock 1: 11842; Pricing 1: 1=0.48000, 10=0.33000, 50=0.23100, 100=0.19800, 500=0.14850, 1000=0.12540, 2500=0.11880 (USD); Mount: Surface Mount; Case/Package: 1206; Case Code (Imperial): 1206; Case Code (Metric): 3216; Min Operating Temperature: -55°C; Max Operating Temperature: 125°C; Capacitance: 1uF; Voltage Rating: 100V; Voltage Rating (DC): 100V; Packaging: Tape and Reel; Package Quantity: 1; Dielectric: X7R; Termination: SMD/SMT; Series: GRM; Construction: Flat; Length: 3.2mm; Width: 1.6mm; Height: 1.6mm; Thickness: 0.071inch; Depth: 1.6mm; Radiation Hardening: No; RoHS Compliant: Yes; ComponentLink1URL: https://datasheet.ciiva.com/11616/product-11616604.pdf?src-supplier=Avnet; ComponentLink1Description: https://datasheet.ciiva.com/11616/product-11616604.pdf?src-supplier=Avnet; ComponentLink2URL: https://datasheet.ciiva.com/6264/partnumbering-e-01-6264397.pdf?src-supplier=Digi-Key; ComponentLink2Description: https://datasheet.ciiva.com/6264/partnumbering-e-01-6264397.pdf?src-supplier=Digi-Key; ComponentLink3URL: https://datasheet.ciiva.com/6264/partnumbering-e-01-6264398.pdf?src-supplier=Digi-Key; ComponentLink3Description: https://datasheet.ciiva.com/6264/partnumbering-e-01-6264398.pdf?src-supplier=Digi-Key; ComponentLink4URL: https://datasheet.ciiva.com/6264/partnumbering-e-01-6264399.pdf?src-supplier=Digi-Key; ComponentLink4Description: https://datasheet.ciiva.com/6264/partnumbering-e-01-6264399.pdf?src-supplier=Digi-Key; Supplier Part Number 1: 490-6523-1-ND; LCSC Part Number: C909823
footprint Cap-1206 (SMD 1206)
pins: 1, 2

## GRM31CZ72A475KE11L
designator C?, comment 4.7uF
CAP CER, 4.7 uF, 100 V, ± 10%, X7R, 1206 [3216 Metric]; Manufacturer: Murata; Manufacturer Part Number: GRM31CZ72A475KE11L; Material: 4241ConductorMaterial; Voltage Rating: 100V; Item Type: Capacitor; Supplier: Digi-Key; Supplier Part Number: 490-GRM31CZ72A475KE11LCT-ND; RoHS: Yes; Category: Ceramic Capacitors; Stock: 152; Pricing: 1=0.76, 10=0.53, 50=0.4462, 100=0.3633, 500=0.30274, 1000=0.25495 (USD); Case/Package: 340Case; Min Operating Temperature: -55°C; Max Operating Temperature: 125°C; Value: 4.7uF; Tolerance: 10%; Length: 3.2mm; Width: 1.6mm; Height: 1.9mm; Thickness: 1.6mm; RoHS Compliant: Yes; LCSC Part Number: C2997285; ComponentLink1Description: LCSC; ComponentLink1URL: https://www.lcsc.com/product-detail/Multilayer-Ceramic-Capacitors-MLCC-SMD-SMT_Murata-Electronics-GRM31CZ72A475KE11L_C2997285.html
footprint Cap-1206 (SMD 1206)
pins: 1, 2

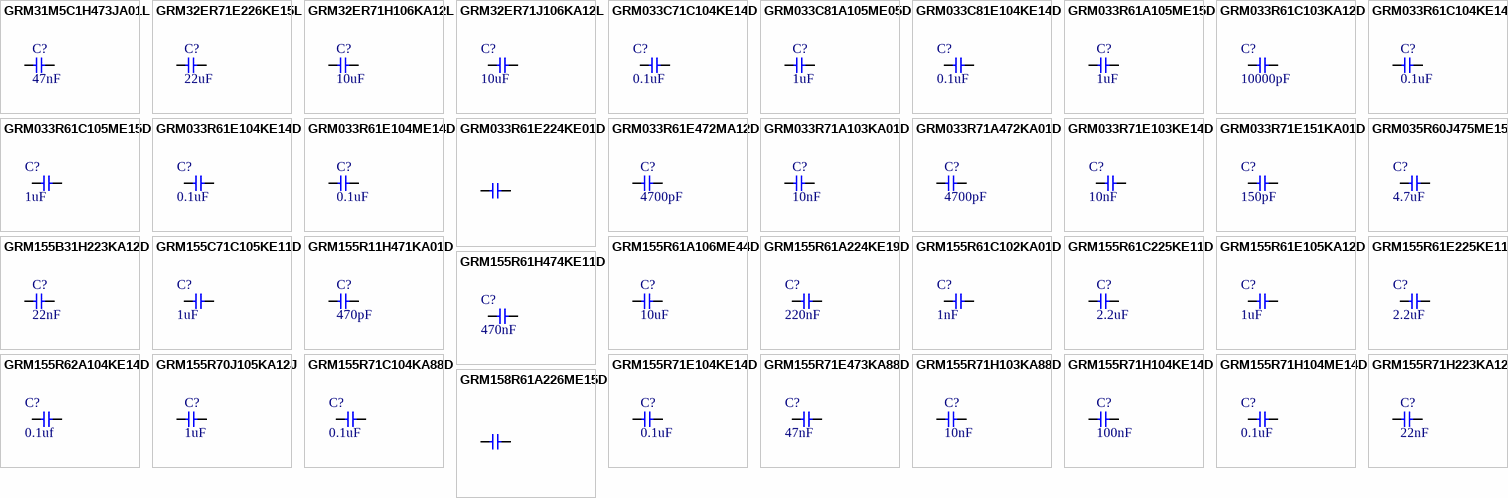
[diagram p13: symbols GRM31M5C1H473JA01L to GRM158R61A226ME15D]

## GRM31M5C1H473JA01L
designator C?, comment 47nF
CAP CER 0.047UF 50V C0G/NP0 1206; Manufacturer: Murata; Manufacturer Part Number: GRM31M5C1H473JA01L; Item Type: Capacitors; Supplier: Mouser; LCSC Part Number: C21812; RoHS: Yes; Stock: 47184; Pricing: 1=0.35, 10=0.204, 50=0.204, 100=0.136, 1000=0.105, 10000=0.077 (USD); Lead Free: 5697LeadFree; ComponentLink1URL: https://datasheet.ciiva.com/3778/2298grm31m5c1h473ja0123-3778751.pdf?src-supplier=Arrow+Electronics; ComponentLink1Description: https://datasheet.ciiva.com/3778/2298grm31m5c1h473ja0123-3778751.pdf?src-supplier=Arrow+Electronics; ComponentLink2URL: https://datasheet.ciiva.com/11787/0900766b807a1cab-11787099.pdf?src-supplier=Rs; ComponentLink2Description: https://datasheet.ciiva.com/11787/0900766b807a1cab-11787099.pdf?src-supplier=Rs; ComponentLink3URL: https://datasheet.ciiva.com/19476/1859538-19476197.pdf?src-supplier=Jameco; ComponentLink3Description: https://datasheet.ciiva.com/19476/1859538-19476197.pdf?src-supplier=Jameco; ComponentLink4URL: https://datasheet.ciiva.com/29200/453456-da-01-en-vs-kondensator-1206-29200216.pdf?src-supplier=Conrad; ComponentLink4Description: https://datasheet.ciiva.com/29200/453456-da-01-en-vs-kondensator-1206-29200216.pdf?src-supplier=Conrad; ComponentLink5URL: https://datasheet.ciiva.com/16298/product-16298058.pdf?src-supplier=Future+Electronics; ComponentLink5Description: https://datasheet.ciiva.com/16298/product-16298058.pdf?src-supplier=Future+Electronics; ComponentLink6URL: https://datasheet.ciiva.com/139/partnumbering-e-01-139852.pdf?src-supplier=Digikey; ComponentLink6Description: https://datasheet.ciiva.com/139/partnumbering-e-01-139852.pdf?src-supplier=Digikey; ComponentLink7URL: https://datasheet.ciiva.com/139/partnumbering-e-01-139853.pdf?src-supplier=Digikey; ComponentLink7Description: https://datasheet.ciiva.com/139/partnumbering-e-01-139853.pdf?src-supplier=Digikey; ComponentLink8URL: https://datasheet.ciiva.com/139/partnumbering-e-01-139854.pdf?src-supplier=Digikey; ComponentLink8Description: https://datasheet.ciiva.com/139/partnumbering-e-01-139854.pdf?src-supplier=Digikey
footprint Cap-1206 (SMD 1206)
pins: 1, 2

## GRM32ER71E226KE15L
designator C?, comment 22uF
CAP CER 22UF 25V X7R 1210; Manufacturer: Murata; Manufacturer Part Number: GRM32ER71E226KE15L; Item Type: Capacitors; Color: 46Colour; Current Rating: 3A; Gender: 29Gender; Supplier: Mouser; LCSC Part Number: C21397; RoHS: Yes; Stock: 50822; Pricing: 1=0.78, 10=0.39, 50=0.39, 100=0.351, 1000=0.297, 10000=0.267 (USD); Contact Material: 150ConductorMaterial; Contact Plating: 157ConductorMaterial; Lead Pitch: 2.54mm; Lead Free: 5697LeadFree; ComponentLink1URL: https://datasheet.ciiva.com/16497/product-16497009.pdf?src-supplier=Future+Electronics; ComponentLink1Description: https://datasheet.ciiva.com/16497/product-16497009.pdf?src-supplier=Future+Electronics; ComponentLink2URL: https://datasheet.ciiva.com/6072/1697714-6072768.pdf?src-supplier=Farnell; ComponentLink2Description: https://datasheet.ciiva.com/6072/1697714-6072768.pdf?src-supplier=Farnell; ComponentLink3URL: https://datasheet.ciiva.com/3776/2741grm32er71e226ke1523-3776996.pdf?src-supplier=Arrow+Electronics; ComponentLink3Description: https://datasheet.ciiva.com/3776/2741grm32er71e226ke1523-3776996.pdf?src-supplier=Arrow+Electronics; ComponentLink4URL: https://datasheet.ciiva.com/11789/0900766b80ef921d-11789129.pdf?src-supplier=Rs; ComponentLink4Description: https://datasheet.ciiva.com/11789/0900766b80ef921d-11789129.pdf?src-supplier=Rs; ComponentLink5URL: https://datasheet.ciiva.com/29201/451826-da-01-de-vs-kondens-grm32-er71e-226ke15l-29201795.pdf?src-supplier=Conrad; ComponentLink5Description: https://datasheet.ciiva.com/29201/451826-da-01-de-vs-kondens-grm32-er71e-226ke15l-29201795.pdf?src-supplier=Conrad; ComponentLink6URL: https://datasheet.ciiva.com/22703/1697714-22703397.pdf?src-supplier=Element14; ComponentLink6Description: https://datasheet.ciiva.com/22703/1697714-22703397.pdf?src-supplier=Element14; ComponentLink7URL: https://datasheet.ciiva.com/175/partnumbering-e-01-175746.pdf?src-supplier=Digikey; ComponentLink7Description: https://datasheet.ciiva.com/175/partnumbering-e-01-175746.pdf?src-supplier=Digikey; ComponentLink8URL: https://datasheet.ciiva.com/175/partnumbering-e-01-175747.pdf?src-supplier=Digikey; ComponentLink8Description: https://datasheet.ciiva.com/175/partnumbering-e-01-175747.pdf?src-supplier=Digikey; ComponentLink9URL: https://datasheet.ciiva.com/175/partnumbering-e-01-175748.pdf?src-supplier=Digikey; ComponentLink9Description: https://datasheet.ciiva.com/175/partnumbering-e-01-175748.pdf?src-supplier=Digikey
footprint Cap-1210 (SMD 1210)
pins: 1, 2

## GRM32ER71H106KA12L
designator C?, comment 10uF
CAP CER 10UF 50V X7R 1210; Manufacturer: Murata; Manufacturer Part Number: GRM32ER71H106KA12L; Item Type: Capacitors; Supplier: Future Electronics; LCSC Part Number: C77102; RoHS: Yes; Stock: 960000; Pricing: 1000=0.325, 2000=0.32, 3000=0.315, 4000=0.315, 5000=0.305 (USD); Lead Free: 5697LeadFree; RoHS Compliant: 5897YesNo; ComponentLink1URL: https://datasheet.ciiva.com/16497/product-16497010.pdf?src-supplier=Future+Electronics; ComponentLink1Description: https://datasheet.ciiva.com/16497/product-16497010.pdf?src-supplier=Future+Electronics; ComponentLink2URL: https://datasheet.ciiva.com/3777/4286grm32er71h106ka1223-3777306.pdf?src-supplier=Arrow+Electronics; ComponentLink2Description: https://datasheet.ciiva.com/3777/4286grm32er71h106ka1223-3777306.pdf?src-supplier=Arrow+Electronics; ComponentLink3URL: https://datasheet.ciiva.com/11789/0900766b80ef921d-11789081.pdf?src-supplier=Rs; ComponentLink3Description: https://datasheet.ciiva.com/11789/0900766b80ef921d-11789081.pdf?src-supplier=Rs; ComponentLink4URL: https://datasheet.ciiva.com/11607/c02e-11607596.pdf?src-supplier=Avnet; ComponentLink4Description: https://datasheet.ciiva.com/11607/c02e-11607596.pdf?src-supplier=Avnet; ComponentLink5URL: https://datasheet.ciiva.com/6270/partnumbering-e-01-6270167.pdf?src-supplier=Digikey; ComponentLink5Description: https://datasheet.ciiva.com/6270/partnumbering-e-01-6270167.pdf?src-supplier=Digikey; ComponentLink6URL: https://datasheet.ciiva.com/6270/partnumbering-e-01-6270168.pdf?src-supplier=Digikey; ComponentLink6Description: https://datasheet.ciiva.com/6270/partnumbering-e-01-6270168.pdf?src-supplier=Digikey; ComponentLink7URL: https://datasheet.ciiva.com/6270/partnumbering-e-01-6270169.pdf?src-supplier=Digikey; ComponentLink7Description: https://datasheet.ciiva.com/6270/partnumbering-e-01-6270169.pdf?src-supplier=Digikey; ComponentLink8URL: https://datasheet.ciiva.com/46441/1754714-46441340.pdf?src-supplier=Element14; ComponentLink8Description: https://datasheet.ciiva.com/46441/1754714-46441340.pdf?src-supplier=Element14
footprint Cap-1210 (SMD 1210)
pins: 1, 2

## GRM32ER71J106KA12L
designator C?, comment 10uF
CAP CER 10UF 63V X7R 1210; Manufacturer: Murata; Manufacturer Part Number: GRM32ER71J106KA12L; Item Type: Capacitor; Supplier: Avnet; Supplier Part Number: GRM32ER71J106KA12L; RoHS: Yes; Stock: 55000; Pricing: 1000=0.3451, 2000=0.33698, 4000=0.32886, 6000=0.32074, 8000=0.31262 (USD); ComponentLink1URL: http://www.mouser.com/ds/2/281/c02e-2905.pdf?src-supplier=Mouser; ComponentLink1Description: http://www.mouser.com/ds/2/281/c02e-2905.pdf?src-supplier=Mouser; ComponentLink2URL: http://www.farnell.com/datasheets/2079202.pdf?src-supplier=Farnell; ComponentLink2Description: http://www.farnell.com/datasheets/2079202.pdf?src-supplier=Farnell; ComponentLink3URL: http://search.murata.co.jp/Ceramy/image/img/A01X/G101/ENG/GRM32ER71J106KA12-01.pdf?src-supplier=Digi-Key; ComponentLink3Description: http://search.murata.co.jp/Ceramy/image/img/A01X/G101/ENG/GRM32ER71J106KA12-01.pdf?src-supplier=Digi-Key; ComponentLink4URL: https://datasheet.octopart.com/GRM32ER71J106KA12L-Murata-datasheet-22122223.pdf?src-supplier=Future+Electronics; ComponentLink4Description: https://datasheet.octopart.com/GRM32ER71J106KA12L-Murata-datasheet-22122223.pdf?src-supplier=Future+Electronics; ComponentLink5URL: http://psearch.en.murata.com/capacitor/product/GRM32ER71J106KA12%23.pdf?src-supplier=Avnet; ComponentLink5Description: http://psearch.en.murata.com/capacitor/product/GRM32ER71J106KA12%23.pdf?src-supplier=Avnet; ComponentLink6URL: http://www.farnell.com/datasheets/2079202.pdf?src-supplier=Newark; ComponentLink6Description: http://www.farnell.com/datasheets/2079202.pdf?src-supplier=Newark; ComponentLink7URL: http://www.farnell.com/datasheets/2079202.pdf?src-supplier=Element14; ComponentLink7Description: http://www.farnell.com/datasheets/2079202.pdf?src-supplier=Element14; Package: 1210; LCSC Part Number: C437568; ComponentLink8Description: LCSC; ComponentLink8URL: https://www.lcsc.com/product-detail/Multilayer-Ceramic-Capacitors-MLCC-SMD-SMT_Murata-Electronics-GRM32ER71J106KA12L_C437568.html
footprint Cap-1210 (SMD 1210)
pins: 1, 2

## GRM033C71C104KE14D
designator C?, comment 0.1uF
CAP CER 0.1UF 16V X7S 0201; Manufacturer: Murata; Manufacturer Part Number: GRM033C71C104KE14D; Item Type: Capacitors; Material: 4241ConductorMaterial; Supplier: Future Electronics; LCSC Part Number: C85923; RoHS: Yes; Stock: 15000; Pricing: 15000=0.0042, 45000=0.0041, 75000=0.004, 300000=0.0038, 450000=0.0037 (USD); ComponentLink1URL: http://www.mouser.com/ds/2/281/c02e-2905.pdf?src-supplier=Mouser; ComponentLink1Description: http://www.mouser.com/ds/2/281/c02e-2905.pdf?src-supplier=Mouser; ComponentLink2URL: http://www.farnell.com/datasheets/2867828.pdf?src-supplier=Farnell; ComponentLink2Description: http://www.farnell.com/datasheets/2867828.pdf?src-supplier=Farnell; ComponentLink3URL: http://www.farnell.com/datasheets/2867828.pdf?src-supplier=Newark; ComponentLink3Description: http://www.farnell.com/datasheets/2867828.pdf?src-supplier=Newark; ComponentLink4URL: http://www.farnell.com/datasheets/2867828.pdf?src-supplier=Element14; ComponentLink4Description: http://www.farnell.com/datasheets/2867828.pdf?src-supplier=Element14; ComponentLink5URL: https://search.murata.co.jp/Ceramy/image/img/A01X/G101/ENG/GRM033C71C104KE14-01.pdf?src-supplier=Digikey; ComponentLink5Description: https://search.murata.co.jp/Ceramy/image/img/A01X/G101/ENG/GRM033C71C104KE14-01.pdf?src-supplier=Digikey; ComponentLink6URL: https://datasheet.octopart.com/GRM033C71C104KE14D-Murata-datasheet-22122223.pdf?src-supplier=Future+Electronics; ComponentLink6Description: https://datasheet.octopart.com/GRM033C71C104KE14D-Murata-datasheet-22122223.pdf?src-supplier=Future+Electronics; ComponentLink7URL: https://datasheet.octopart.com/GRM033C71C104KE14D-Murata-datasheet-165579666.pdf?src-supplier=TME; ComponentLink7Description: https://datasheet.octopart.com/GRM033C71C104KE14D-Murata-datasheet-165579666.pdf?src-supplier=TME
footprint CAP-0201
pins: 1, 2

## GRM033C81A105ME05D
designator C?, comment 1uF
CAP CER 1UF 10V X6S 0201; Manufacturer: Murata; Manufacturer Part Number: GRM033C81A105ME05D; Item Type: Capacitors; Material: 4241ConductorMaterial; Dielectric: 1541DielectricType; Supplier: Future Electronics; LCSC Part Number: C237278; RoHS: Yes; Stock: 165000; Pricing: 15000=0.0628, 30000=0.0611 (USD); Voltage Rating (DC): 10V; Height: 390um; ComponentLink1URL: http://search.murata.co.jp/Ceramy/image/img/A01X/G101/ENG/GRM033C81A105ME05-01.pdf?src-supplier=Digikey; ComponentLink1Description: http://search.murata.co.jp/Ceramy/image/img/A01X/G101/ENG/GRM033C81A105ME05-01.pdf?src-supplier=Digikey; ComponentLink2URL: https://datasheet.octopart.com/GRM033C81A105ME05D-Murata-datasheet-86813717.pdf?src-supplier=Future+Electronics; ComponentLink2Description: https://datasheet.octopart.com/GRM033C81A105ME05D-Murata-datasheet-86813717.pdf?src-supplier=Future+Electronics; ComponentLink3URL: https://datasheet.octopart.com/GRM033C81A105ME05D-Murata-datasheet-165579666.pdf?src-supplier=TME; ComponentLink3Description: https://datasheet.octopart.com/GRM033C81A105ME05D-Murata-datasheet-165579666.pdf?src-supplier=TME
footprint CAP-0201
pins: 1, 2

## GRM033C81E104KE14D
designator C?, comment 0.1uF
CAP CER 0.1UF 25V X6S 0201; Manufacturer: Murata; Manufacturer Part Number: GRM033C81E104KE14D; Capacitance: 100nF; Tolerance: 10%; Supplier 1: Digi-Key; RoHS: Yes; Category: Ceramic Capacitors; Stock 1: 91; Pricing 1: 1=0.10000, 10=0.05100, 50=0.02780, 100=0.02260, 500=0.01616, 1000=0.01270, 2500=0.01155, 5000=0.01063 (USD); Mount: Surface Mount; Case/Package: 0201; Case Code (Metric): 0603; Case Code (Imperial): 0201; Weight: 1.2E-05oz; Min Operating Temperature: -55°C; Max Operating Temperature: 105°C; Packaging: Tape and Reel; Voltage Rating: 25V; Dielectric: X6S; Termination: SMD/SMT; Voltage Rating (DC): 25V; Package Quantity: 15000; Length: 0.024inch; Width: 0.3mm; Height: 0.3mm; Thickness: 0.013inch; RoHS Compliant: Yes; ComponentLink1URL: http://www.mouser.com/ds/2/281/c02e-2905.pdf?src-supplier=Mouser; ComponentLink1Description: http://www.mouser.com/ds/2/281/c02e-2905.pdf?src-supplier=Mouser; ComponentLink2URL: http://www.farnell.com/datasheets/2722733.pdf?src-supplier=Farnell; ComponentLink2Description: http://www.farnell.com/datasheets/2722733.pdf?src-supplier=Farnell; ComponentLink3URL: http://search.murata.co.jp/Ceramy/image/img/A01X/G101/ENG/GRM033C81E104KE14-01.pdf?src-supplier=Digi-Key; ComponentLink3Description: http://search.murata.co.jp/Ceramy/image/img/A01X/G101/ENG/GRM033C81E104KE14-01.pdf?src-supplier=Digi-Key; Supplier Part Number 1: 490-10403-1-ND
footprint CAP-0201
pins: 1, 2

## GRM033R61A105ME15D
designator C?, comment 1uF
CAP CER 1UF 10V X5R 0201; Manufacturer: Murata; Manufacturer Part Number: GRM033R61A105ME15D; Item Type: Capacitors; Material: 4241ConductorMaterial; Dielectric: 1537DielectricType; Supplier: Future Electronics; Supplier Part Number: 2088392; RoHS: Yes; Stock: 3090000; Pricing: 15000=0.0577, 30000=0.0561 (USD); Voltage Rating (DC): 10V; Height: 390um
footprint CAP-0201
pins: 1, 2